# Altium schematic symbol library Schlib1.SchLib: 8 symbols
Pins are listed as number, name and electrical type; pins without a type are passive.

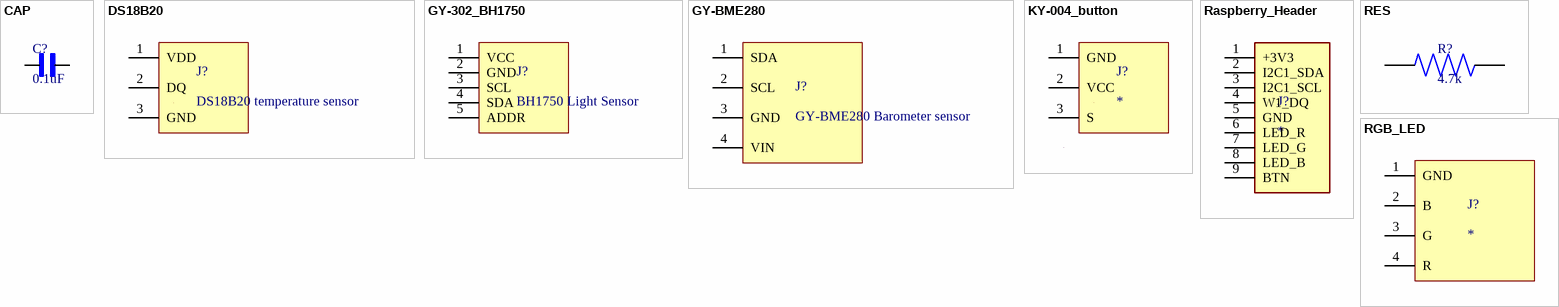
[diagram p0: symbols CAP to RGB_LED]

## CAP
designator C?, comment 0.1uF
footprint CAP_RAD_2.54mm
pins: 1, 2

## DS18B20
designator J?, comment DS18B20 temperature sensor
footprint J_DS18B20
pins: 1 VDD, 2 DQ, 3 GND

## GY-302_BH1750
designator J?, comment BH1750 Light Sensor
footprint J_GY-302
pins: 1 VCC, 2 GND, 3 SCL, 4 SDA, 5 ADDR

## GY-BME280
designator J?, comment GY-BME280 Barometer sensor
footprint J_GY-BME280
pins: 1 SDA, 2 SCL, 3 GND, 4 VIN

## KY-004_button
designator J?
footprint J_button
pins: 1 GND, 2 VCC, 3 S

## Raspberry_Header
designator J?
footprint J_Raspberry_Header
pins: 1 +3V3, 2 I2C1_SDA , 3 I2C1_SCL, 4 W1_DQ, 5 GND, 6 LED_R, 7 LED_G, 8 LED_B, 9 BTN

## RES
designator R?, comment 4.7k
footprint RES_AXIAL_0.25W_P7.62mm
pins: 1, 2

## RGB_LED
designator J?
footprint J_RGB_LED
pins: 1 GND, 2 B, 3 G, 4 R